# Altium footprint library Footprint.PcbLib: 411 footprints (part 26 of 26)
Each footprint in its own frame and in the unit in brackets; x right, y up, seen from the top. Pads: shape width x height; smd on the part's side, far side on the other; paste and mask are expansions set on the pad; w line width, h text height; cw(c..) or ccw(c..) is an arc to the next point about the centre after c.
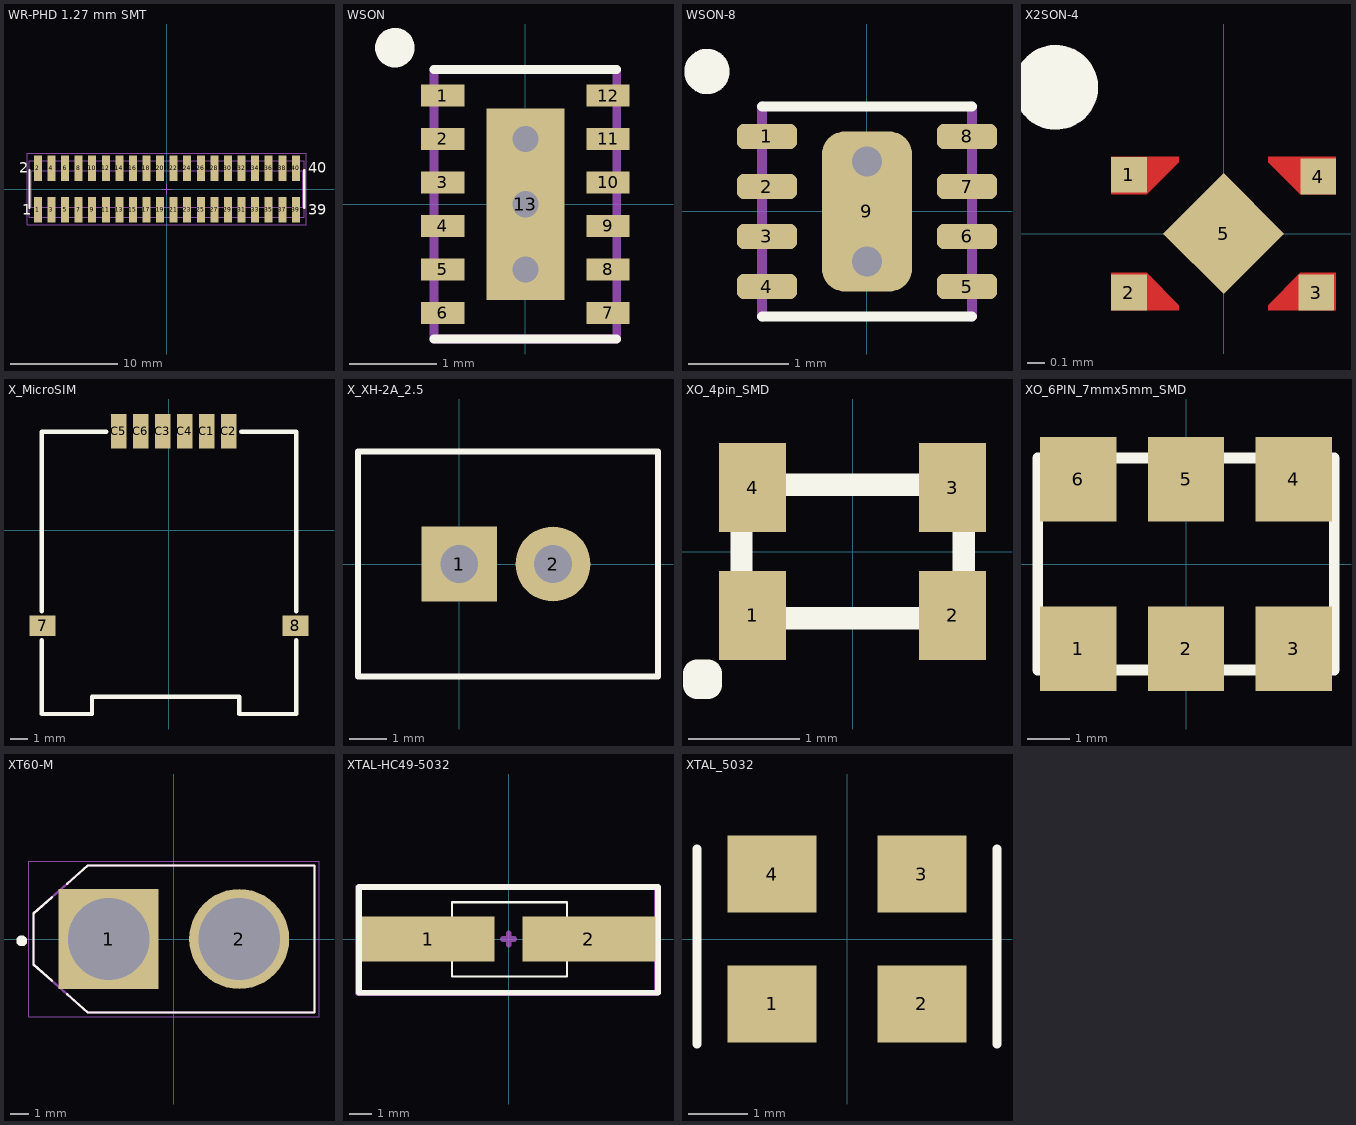
[diagram p25: the footprints below, top view; thin cyan lines are the x and y axes]

## WR-PHD 1.27 mm SMT [mm] "Pin Header, pitch 1.27 mm, SMD, Vertical, dual row, 40p"
height 6.55
pads (40):
  rect 0.75x2.4 smd: 1(-12.065,-1.95) 2(-12.065,1.95) 3(-10.795,-1.95) 4(-10.795,1.95) 5(-9.525,-1.95) 6(-9.525,1.95) 7(-8.255,-1.95) 8(-8.255,1.95) 9(-6.985,-1.95) 10(-6.985,1.95) 11(-5.715,-1.95) 12(-5.715,1.95) 13(-4.445,-1.95) 14(-4.445,1.95) 15(-3.175,-1.95) 16(-3.175,1.95) 17(-1.905,-1.95) 18(-1.905,1.95) 19(-0.635,-1.95) 20(-0.635,1.95) 21(0.635,-1.95) 22(0.635,1.95) 23(1.905,-1.95) 24(1.905,1.95) 25(3.175,-1.95) 26(3.175,1.95) 27(4.445,-1.95) 28(4.445,1.95) 29(5.715,-1.95) 30(5.715,1.95) 31(6.985,-1.95) 32(6.985,1.95) 33(8.255,-1.95) 34(8.255,1.95) 35(9.525,-1.95) 36(9.525,1.95) 37(10.795,-1.95) 38(10.795,1.95) 39(12.065,-1.95) 40(12.065,1.95)
Top Overlay:
  lines w0.2: -12.85,-1.775 -12.85,1.775 ; 12.85,-1.775 12.85,1.775
  text "1" at -13.53,-2.4 h1
  text "2" at -13.83,1.5 h1
  text "39" at 13.23,-2.4 h1
  text "40" at 13.23,1.5 h1
Mechanical 11:
  lines w0.1: -12.7,-1.7 -12.7,1.7 12.7,1.7 12.7,-1.7 -12.7,-1.7
Mechanical 13:
  lines w0.1: -12.85,-2.625 12.85,-2.625 12.85,2.625 -12.85,2.625 -12.85,-2.625
Mechanical 15:
  lines w0.1: -0.5,0 0.5,0 ; 0,-0.5 0,0.5 ; -13.05,-3.35 -13.05,3.35 13.05,3.35 13.05,-3.35 -13.05,-3.35
3D body "62104021021.stp": height 5.9, standoff -0.01, extent -12.7,-2.5 12.7,2.5

## WSON [mm]
pads (13):
  rect 0.5x0.25 smd: 1(-0.95,1.25) 2(-0.95,0.75) 3(-0.95,0.25) 4(-0.95,-0.25) 5(-0.95,-0.75) 6(-0.95,-1.25) 7(0.95,-1.25) 8(0.95,-0.75) 9(0.95,-0.25) 10(0.95,0.25) 11(0.95,0.75) 12(0.95,1.25)
  rect 0.9x2.2 smd: 13(0,0)
via 0,0 diameter 0.6 hole 0.3
via 0,0.75 diameter 0.6 hole 0.3
via 0,-0.75 diameter 0.6 hole 0.3
Top Overlay:
  circle w0.254: c-1.5,1.8 r0.1
  lines w0.1: -1.05,-1.55 1.05,-1.55 ; -1.05,1.55 1.05,1.55
Mechanical 15:
  lines w0.1: -1.05,-1.55 -1.05,1.55 1.05,1.55 1.05,-1.55 -1.05,-1.55
3D body: height 0.8, standoff 0, extent -1.05,-1.55 1.05,1.55

## WSON-8 [mm]
pads (9):
  rrect50% 0.6x0.25 smd: 1(-1,0.75) 2(-1,0.25) 3(-1,-0.25) 4(-1,-0.75) 5(1,-0.75) 6(1,-0.25) 7(1,0.25) 8(1,0.75)
  rrect50% 0.9x1.6 smd: 9(0,0)
via 0,-0.5 diameter 0.6 hole 0.3
via 0,0.5 diameter 0.6 hole 0.3
Top Overlay:
  circle w0.254: c-1.6,1.4 r0.1
  lines w0.1: -1.05,-1.05 1.05,-1.05 ; -1.05,1.05 1.05,1.05
Mechanical 15:
  lines w0.1: -1.05,-1.05 -1.05,1.05 ; 1.05,-1.05 1.05,1.05
3D body: height 0.8, standoff 0, extent -1.05,-1.05 1.05,1.05

## X2SON-4 [mm]
pads (5):
  rect 0.2x0.2 smd mask+0: 1(-0.53,0.33) 2(-0.53,-0.33) 3(0.52,-0.33) 4(0.53,0.32)
  rect 0.48x0.48 smd rot 45: 5(0,0)
Top Layer:
  region: 0.63,-0.43 0.63,-0.22 0.43,-0.22 0.25,-0.4 0.25,-0.43
  region: -0.63,0.43 -0.63,0.22 -0.43,0.22 -0.25,0.4 -0.25,0.43
  region: 0.63,0.43 0.63,0.22 0.43,0.22 0.25,0.4 0.25,0.43
  region: -0.63,-0.43 -0.63,-0.22 -0.43,-0.22 -0.25,-0.4 -0.25,-0.43
Top Overlay:
  circle w0.254: c-0.94,0.82 r0.11
3D body: height 0.4, standoff 0, extent -0.525,-0.525 0.525,0.525

## X_MicroSIM [mm]
pads (8):
  rect 1.5x1.2 smd: 7(-7.3,-5.525) 8(7.3,-5.525)
  rect 0.9x2 smd: C1(2.18,5.7) C2(3.45,5.7) C3(-0.36,5.7) C4(0.91,5.7) C5(-2.9,5.7) C6(-1.63,5.7)
Top Overlay:
  lines w0.254: -7.35,-6.356 -7.35,-10.625 -4.445,-10.625 -4.445,-9.625 4.046,-9.625 4.046,-10.625 7.35,-10.625 7.35,-6.356 ; -7.35,-4.694 -7.35,5.675 -3.631,5.675 ; 4.181,5.675 7.35,5.675 7.35,-4.694

## X_XH-2A_2.5 [mm]
pads (2):
  rect 2x2 hole 1: 1(0,0)
  round 2 hole 1: 2(2.5,0)
Top Overlay:
  lines w0.15: -2.7,-3 -2.7,3 5.3,3 5.3,-3 -2.7,-3
3D body "User Library-XH2_54_2PIN.step": height 7, standoff -4, extent -2.7,-3 5.3,3

## XO_4pin_SMD [mm]
pads (4):
  rect 0.6x0.8 smd: 1(-0.9,-0.575) 2(0.9,-0.575) 3(0.9,0.575) 4(-0.9,0.575)
Top Overlay:
  lines w0.2: -1,-0.6 1,-0.6 1,0.6 -1,0.6 -1,-0.6
  lines w0.254: -1.4,-1.2 -1.4,-1.1 -1.3,-1.1 -1.3,-1.2 -1.4,-1.2

## XO_6PIN_7mmx5mm_SMD [mm]
pads (6):
  rect 1.8x2 smd: 1(-2.54,-2) 2(0,-2) 3(2.54,-2) 4(2.54,2) 5(0,2) 6(-2.54,2)
Top Overlay:
  lines w0.254: -3.5,-2.5 -3.5,2.5 3.5,2.5 3.5,-2.5 -3.5,-2.5

## XT60-M [mm]
pads (2):
  rect 5.516x5.516 hole 4.5: 1(-3.6,0)
  round 5.516 hole 4.5: 2(3.6,0)
Top Overlay:
  circle w0.3: c-8.4,-0.1 r0.15
  lines w0.127: -6.73,-2.3 -7.75,-1.4 -7.75,1.4 -6.73,2.3 ; -5.88,-3.05 -4.75,-4.05 7.75,-4.05 7.75,4.05 -4.75,4.05 -5.88,3.05
Mechanical 13:
  lines w0.127: -7.75,-1.4 -4.75,-4.05 7.75,-4.05 7.75,4.05 -4.75,4.05 -7.75,1.4 -7.75,-1.4
Mechanical 15:
  lines w0.05: -8,-4.3 8,-4.3 8,4.3 -8,4.3 -8,-4.3
3D body "XT60-M--3DModel-STEP-56544.STEP": height 16, standoff -4.5, extent -7.75,-4.064 7.75,4.036

## XTAL-HC49-5032 [mm]
pads (2):
  rect 5.9x2 smd: 1(-3.575,0) 2(3.575,0)
Top Overlay:
  lines w0.1: -2.523,-1.663 2.602,-1.663 2.602,1.637 -2.523,1.637 -2.523,-1.663
  lines w0.254: -6.655,-2.39 6.645,-2.39 6.645,2.31 -6.655,2.31 -6.655,-2.39
Mechanical 15:
  lines w0.254: -0.254,0 0.254,0 ; 0,-0.254 0,0.254 ; -6.7,-2.4 -6.7,2.3 6.6,2.3 6.6,-2.4 -6.7,-2.4
  text ".Designator" at -2.5,2.7 h1.52

## XTAL_5032 [mm]
pads (4):
  rect 1.5x1.3 smd: 1(-1.27,-1.1) 2(1.27,-1.1) 3(1.27,1.1) 4(-1.27,1.1)
Top Overlay:
  lines w0.15: -2.54,-1.778 -2.54,1.524 ; 2.54,-1.778 2.54,1.524
3D body "User Library-CRYSTALSMD5X32.step": height 1, standoff 0, extent -2.5,-1.676 2.5,1.524